# Altium integrated library 430450612.IntLib: 1 symbol
Pins are listed as number, name and electrical type; pins without a type are passive.

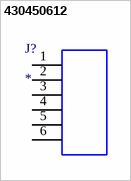
[diagram p0: symbol 430450612]

## 430450612
designator J?
Conn Wire to Board HDR 6 POS 3mm Solder ST Top Entry Thru-Hole Micro-Fit 3.0â„¢ Tray; MF: Molex; MP: 430450612; SnapEDA_Link: https://www.snapeda.com/parts/430450612/Molex/view-part/?ref=snap; Package: None; Value: *; Check_prices: https://www.snapeda.com/parts/430450612/Molex/view-part/?ref=eda
footprint CONN_SD-43045-005_06_MOL
pins: 1, 2, 3, 4, 5, 6